# Altium integrated library MPU-9250.IntLib: 1 symbol
Pins are listed as number, name and electrical type; pins without a type are passive.

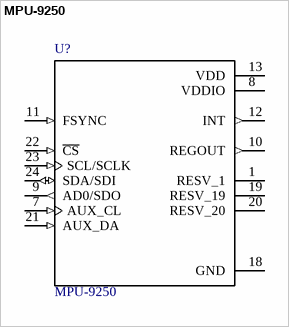
[diagram p0: symbol MPU-9250]

## MPU-9250
designator U?
SMD Gyroscope/Accelerometer/Magnetometer Sensor; 9-AXIS; MF: TDK InvenSense; SnapEDA_Link: https://www.snapeda.com/parts/MPU-9250/TDK%20InvenSense/view-part/?ref=snap; Digi-Key_Part_Number: 1428-1019-1-ND; Digi-Key_Purchase_URL: https://www.digikey.com.tr/product-detail/en/tdk-invensense/MPU-9250/1428-1019-1-ND/4626450?utm_source=snapeda&utm_medium=aggregator&utm_campaign=symbol; MP: MPU-9250; Package: QFN-24 TDK InvenSense; Value: *
footprint *QFN40P300X300X105-24N
pins: 1 RESV_1, 7 AUX_CL (in), 8 VDDIO (power), 9 AD0/SDO (out), 10 REGOUT (out), 11 FSYNC (in), 12 INT (out), 13 VDD (power), 18 GND (power), 19 RESV_19, 20 RESV_20, 21 AUX_DA (in), 22 ~{CS} (in), 23 SCL/SCLK (in), 24 SDA/SDI (io)